# Altium footprint library Resistor_length6.3_pitch7.62.PcbLib: 1 footprints
Each footprint in its own frame and in the unit in brackets; x right, y up, seen from the top. Pads: shape width x height; smd on the part's side, far side on the other; paste and mask are expansions set on the pad; w line width, h text height; cw(c..) or ccw(c..) is an arc to the next point about the centre after c.
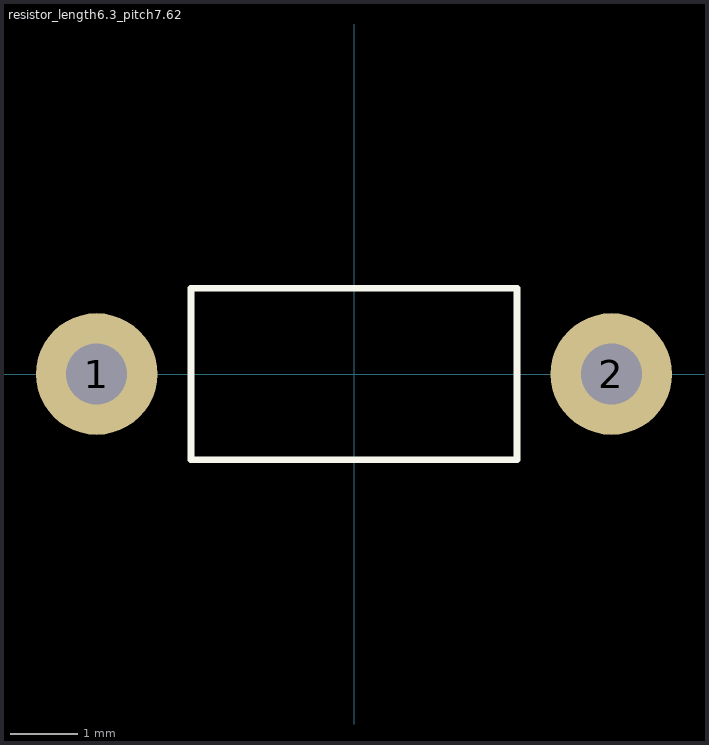
[diagram p0: the footprint, top view; thin cyan lines are the x and y axes]

## resistor_length6.3_pitch7.62 [mm]
pads (2):
  round 1.8 hole 0.9: 1(-3.81,0) 2(3.81,0)
Top Overlay:
  lines w0.1: -2.413,-1.27 2.413,-1.27 2.413,1.27 -2.413,1.27 -2.413,-1.27
3D body "Resistor_6.3x2.4_pitch7.62.step": height 2.7, standoff -6.5, extent -4.109,-1.2 4.109,1.196